# Altium footprint library amirlib.PcbLib: 456 footprints (part 14 of 29)
Each footprint in its own frame and in the unit in brackets; x right, y up, seen from the top. Pads: shape width x height; smd on the part's side, far side on the other; paste and mask are expansions set on the pad; w line width, h text height; cw(c..) or ccw(c..) is an arc to the next point about the centre after c.
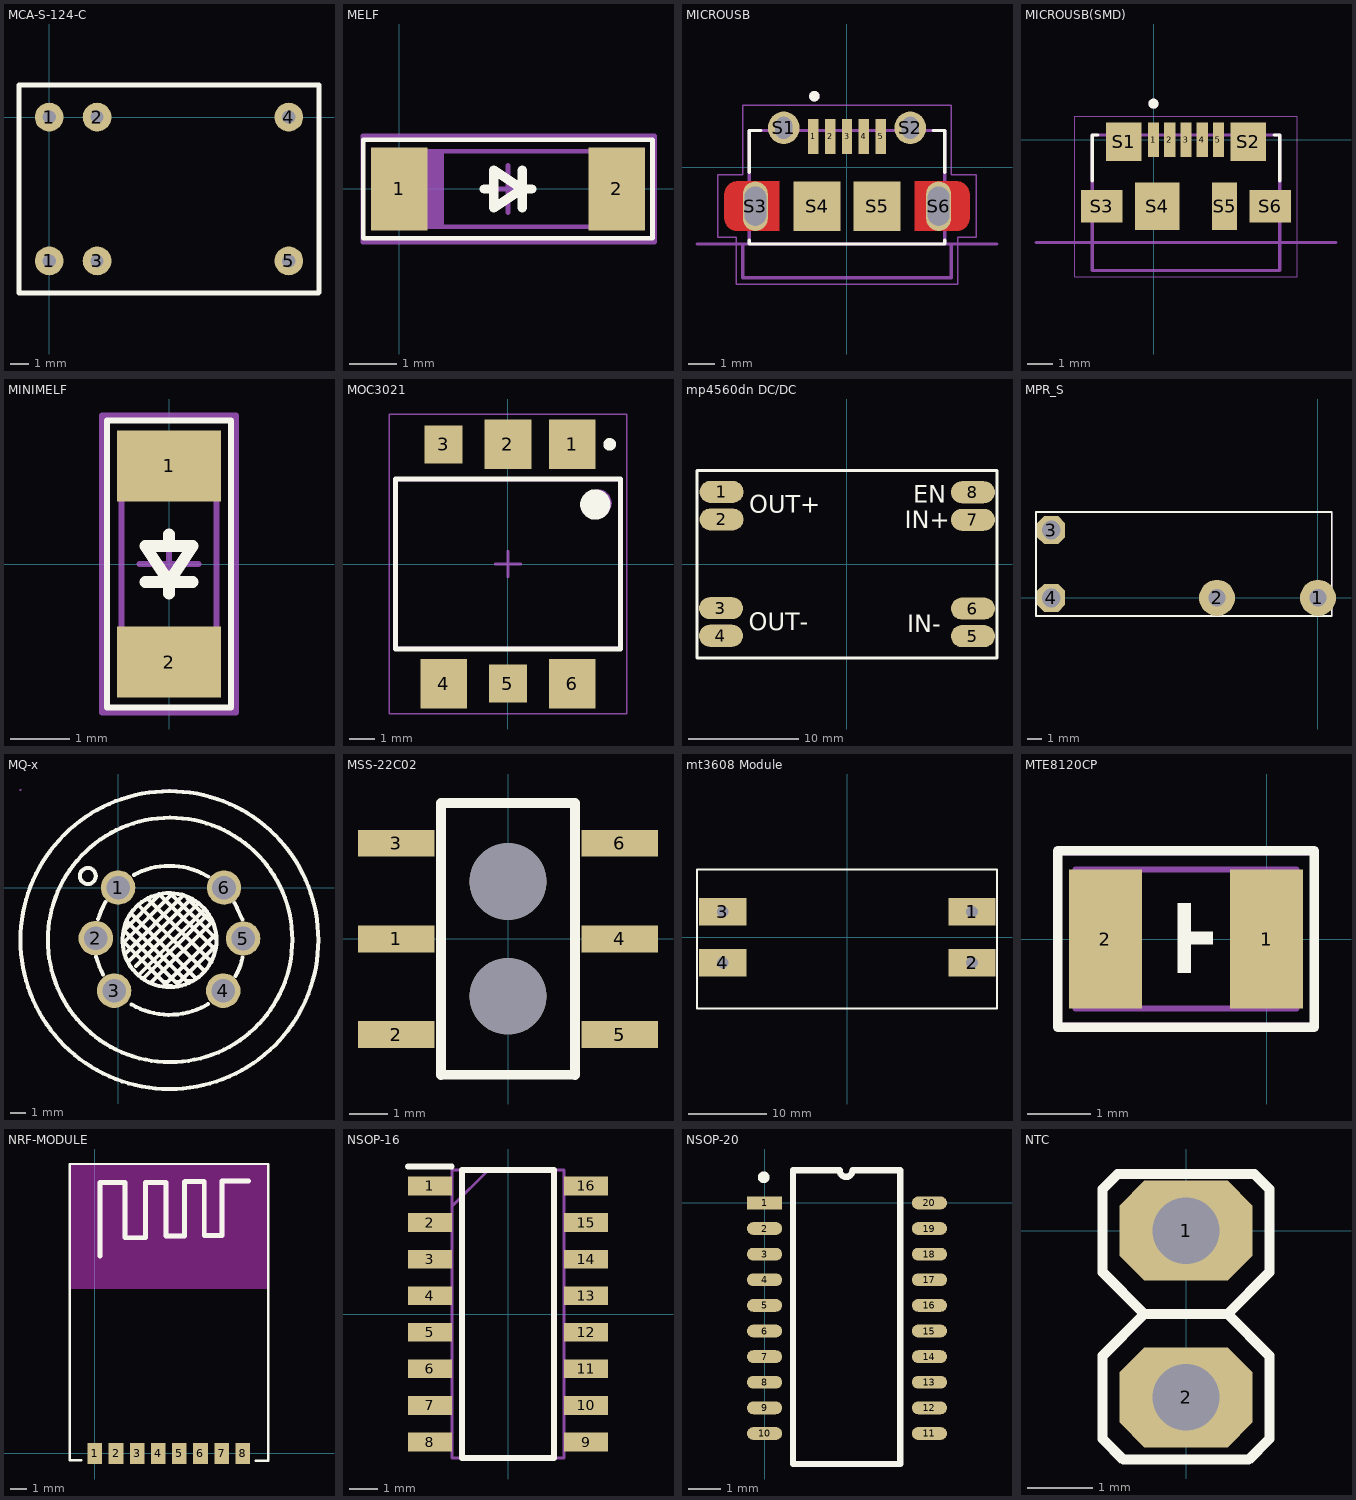
[diagram p13: the footprints below, top view; thin cyan lines are the x and y axes]

## MCA-S-124-C [mil]
pads (6):
  round 60 hole 27.56: 1(0,-300) 1(0,0) 2(100,0) 3(100,-300) 4(500,0) 5(500,-300)
Top Overlay:
  lines w10: -62.99,65.54 -62.99,-366.93 561.99,-366.93 ; -62.99,66.93 562.99,66.93 ; 562.99,-366.54 562.99,66.54

## MELF [mm]
pads (2):
  rect 1.2x1.75 smd: 1(0,0) 2(4.6,0)
Top Overlay:
  lines w0.1: -0.762,-1.041 -0.762,1.041 5.359,1.041 5.359,-1.041 -0.762,-1.041
  lines w0.2: 1.8,0 2,0 ; 2.6,-0.4 2.6,0.4 ; 2.8,0 2.6,0 ; 2.6,0 2,0.4 2,-0.4 2.6,0
Mechanical 13:
  rectangle: 0.45,-0.8 0.948,0.8
  lines w0.1: 0.45,-0.8 4.15,-0.8 4.15,0.8 0.45,0.8 0.45,-0.8
Mechanical 15:
  lines w0.1: 1.8,0 2.8,0 ; 2.3,-0.5 2.3,0.5 ; -0.775,-1.125 5.4,-1.125 5.4,1.125 -0.775,1.125 -0.775,-1.125
3D body "User Library-melf-2.STEP": height 1.59, standoff 0.01, extent 0.473,-0.876 4.173,0.724

## MICROUSB [mm]
pads (11):
  rect 0.4x1.35 smd mask+0.1: 1(-1.3,1.175) 2(-0.65,1.175) 3(0,1.175) 4(0.65,1.175) 5(1.3,1.175)
  oval 1.2x1.25 hole 0.65 slot 0.85 at 90 deg mask+0.1: S1(-2.425,1.5) S2(2.425,1.5)
  oval 0.95x1.9 hole 0.825 slot 1.5 at 90 deg mask+0.1: S3(-3.512,-1.5) S6(3.513,-1.5)
  rect 1.8x1.9 smd mask+0.1: S4(-1.15,-1.5) S5(1.15,-1.5)
Top Layer:
  region: -2.6,-1.5 -3.1,-1.5 -3.1,-1.05 -3.1,-1.034 -3.102,-1.019 -3.104,-1.003 -3.107,-0.988 -3.11,-0.972 -3.115,-0.957 -3.12,-0.942 -3.126,-0.928 -3.133,-0.914 -3.14,-0.9 -3.148,-0.887 -3.157,-0.874 -3.167,-0.861 -3.177,-0.849 -3.188,-0.838 -3.199,-0.827 -3.211,-0.817 -3.224,-0.807 -3.237,-0.798 -3.25,-0.79 -3.264,-0.783 -3.278,-0.776 -3.292,-0.77 -3.307,-0.765 -3.322,-0.76 -3.338,-0.757 -3.353,-0.754 -3.369,-0.752 -3.384,-0.75 -3.641,-0.75 -3.656,-0.752 -3.672,-0.754 -3.687,-0.757 -3.703,-0.76 -3.718,-0.765 -3.733,-0.77 -3.747,-0.776 -3.761,-0.783 -3.775,-0.79 -3.788,-0.798 -3.801,-0.807 -3.814,-0.817 -3.826,-0.827 -3.837,-0.838 -3.848,-0.849 -3.858,-0.861 -3.868,-0.874 -3.877,-0.887 -3.885,-0.9 -3.892,-0.914 -3.899,-0.928 -3.905,-0.942 -3.91,-0.957 -3.915,-0.972 -3.918,-0.988 -3.921,-1.003 -3.923,-1.019 -3.925,-1.034 -3.925,-1.05 -3.925,-1.5 -4.7,-1.5 -4.7,-1.05 -4.699,-1.024 -4.697,-0.998 -4.694,-0.972 -4.689,-0.946 -4.683,-0.921 -4.676,-0.895 -4.667,-0.871 -4.657,-0.847 -4.646,-0.823 -4.633,-0.8 -4.619,-0.778 -4.605,-0.756 -4.589,-0.735 -4.572,-0.715 -4.554,-0.696 -4.535,-0.678 -4.515,-0.661 -4.494,-0.645 -4.472,-0.631 -4.45,-0.617 -4.427,-0.604 -4.403,-0.593 -4.379,-0.583 -4.355,-0.574 -4.329,-0.567 -4.304,-0.561 -4.278,-0.556 -4.252,-0.553 -4.226,-0.551 -4.2,-0.55 -2.6,-0.55
  region: 4.7,-1.95 4.699,-1.976 4.697,-2.002 4.694,-2.028 4.689,-2.054 4.683,-2.079 4.676,-2.105 4.667,-2.129 4.657,-2.153 4.646,-2.177 4.633,-2.2 4.619,-2.222 4.605,-2.244 4.589,-2.265 4.572,-2.285 4.554,-2.304 4.535,-2.322 4.515,-2.339 4.494,-2.355 4.472,-2.369 4.45,-2.383 4.427,-2.396 4.403,-2.407 4.379,-2.417 4.355,-2.426 4.329,-2.433 4.304,-2.439 4.278,-2.444 4.252,-2.447 4.226,-2.449 4.2,-2.45 2.6,-2.45 2.6,-1.5 3.1,-1.5 3.1,-1.95 3.1,-1.966 3.102,-1.981 3.104,-1.997 3.107,-2.012 3.11,-2.028 3.115,-2.043 3.12,-2.058 3.126,-2.072 3.133,-2.086 3.14,-2.1 3.148,-2.113 3.157,-2.126 3.167,-2.139 3.177,-2.151 3.188,-2.162 3.199,-2.173 3.211,-2.183 3.224,-2.193 3.237,-2.202 3.25,-2.21 3.264,-2.217 3.278,-2.224 3.292,-2.23 3.307,-2.235 3.322,-2.24 3.338,-2.243 3.353,-2.246 3.369,-2.248 3.384,-2.25 3.641,-2.25 3.656,-2.248 3.672,-2.246 3.687,-2.243 3.703,-2.24 3.718,-2.235 3.733,-2.23 3.747,-2.224 3.761,-2.217 3.775,-2.21 3.788,-2.202 3.801,-2.193 3.814,-2.183 3.826,-2.173 3.837,-2.162 3.848,-2.151 3.858,-2.139 3.868,-2.126 3.877,-2.113 3.885,-2.1 3.892,-2.086 3.899,-2.072 3.905,-2.058 3.91,-2.043 3.915,-2.028 3.918,-2.012 3.921,-1.997 3.923,-1.981 3.925,-1.966 3.925,-1.95 3.925,-1.5 4.7,-1.5
  region: -2.6,-2.45 -4.2,-2.45 -4.226,-2.449 -4.252,-2.447 -4.278,-2.444 -4.304,-2.439 -4.329,-2.433 -4.355,-2.426 -4.379,-2.417 -4.403,-2.407 -4.427,-2.396 -4.45,-2.383 -4.472,-2.369 -4.494,-2.355 -4.515,-2.339 -4.535,-2.322 -4.554,-2.304 -4.572,-2.285 -4.589,-2.265 -4.605,-2.244 -4.619,-2.222 -4.633,-2.2 -4.646,-2.177 -4.657,-2.153 -4.667,-2.129 -4.676,-2.105 -4.683,-2.079 -4.689,-2.054 -4.694,-2.028 -4.697,-2.002 -4.699,-1.976 -4.7,-1.95 -4.7,-1.5 -3.925,-1.5 -3.925,-1.975 -3.925,-1.989 -3.923,-2.004 -3.922,-2.018 -3.919,-2.032 -3.916,-2.046 -3.912,-2.06 -3.907,-2.074 -3.901,-2.087 -3.895,-2.1 -3.888,-2.113 -3.881,-2.125 -3.872,-2.137 -3.864,-2.148 -3.854,-2.159 -3.844,-2.169 -3.834,-2.179 -3.823,-2.189 -3.812,-2.197 -3.8,-2.206 -3.787,-2.213 -3.775,-2.22 -3.762,-2.226 -3.749,-2.232 -3.735,-2.237 -3.721,-2.241 -3.707,-2.244 -3.693,-2.247 -3.679,-2.248 -3.664,-2.25 -3.384,-2.25 -3.369,-2.248 -3.353,-2.246 -3.338,-2.243 -3.322,-2.24 -3.307,-2.235 -3.292,-2.23 -3.278,-2.224 -3.264,-2.217 -3.25,-2.21 -3.237,-2.202 -3.224,-2.193 -3.211,-2.183 -3.199,-2.173 -3.188,-2.162 -3.177,-2.151 -3.167,-2.139 -3.157,-2.126 -3.148,-2.113 -3.14,-2.1 -3.133,-2.086 -3.126,-2.072 -3.12,-2.058 -3.115,-2.043 -3.11,-2.028 -3.107,-2.012 -3.104,-1.997 -3.102,-1.981 -3.1,-1.966 -3.1,-1.95 -3.1,-1.5 -2.6,-1.5
  region: 4.226,-0.551 4.252,-0.553 4.278,-0.556 4.304,-0.561 4.329,-0.567 4.355,-0.574 4.379,-0.583 4.403,-0.593 4.427,-0.604 4.45,-0.617 4.472,-0.631 4.494,-0.645 4.515,-0.661 4.535,-0.678 4.554,-0.696 4.572,-0.715 4.589,-0.735 4.605,-0.756 4.619,-0.778 4.633,-0.8 4.646,-0.823 4.657,-0.847 4.667,-0.871 4.676,-0.895 4.683,-0.921 4.689,-0.946 4.694,-0.972 4.697,-0.998 4.699,-1.024 4.7,-1.05 4.7,-1.5 3.925,-1.5 3.925,-1.025 3.925,-1.011 3.923,-0.996 3.922,-0.982 3.919,-0.968 3.916,-0.954 3.912,-0.94 3.907,-0.926 3.901,-0.913 3.895,-0.9 3.888,-0.887 3.881,-0.875 3.872,-0.863 3.864,-0.852 3.854,-0.841 3.844,-0.831 3.834,-0.821 3.823,-0.811 3.812,-0.803 3.8,-0.794 3.787,-0.787 3.775,-0.78 3.762,-0.774 3.749,-0.768 3.735,-0.763 3.721,-0.759 3.707,-0.756 3.693,-0.753 3.679,-0.752 3.664,-0.75 3.384,-0.75 3.369,-0.752 3.353,-0.754 3.338,-0.757 3.322,-0.76 3.307,-0.765 3.292,-0.77 3.278,-0.776 3.264,-0.783 3.25,-0.79 3.237,-0.798 3.224,-0.807 3.211,-0.817 3.199,-0.827 3.188,-0.838 3.177,-0.849 3.167,-0.861 3.157,-0.874 3.148,-0.887 3.14,-0.9 3.133,-0.914 3.126,-0.928 3.12,-0.942 3.115,-0.957 3.11,-0.972 3.107,-0.988 3.104,-1.003 3.102,-1.019 3.1,-1.034 3.1,-1.05 3.1,-1.5 2.6,-1.5 2.6,-0.55 4.2,-0.55
Top Overlay:
  circle w0.2: c-1.25,2.715 r0.1
  lines w0.127: -3.75,-2.8 -3.75,-2.95 3.75,-2.95 3.75,-2.8 ; -3.75,-0.2 -3.75,1.4 -3.3,1.4 ; 3.3,1.4 3.75,1.4 3.75,-0.2
Top Paste:
  drawing of 8 lines, arcs and shapes, not listed
Bottom Paste:
  drawing of 8 lines, arcs and shapes, not listed
Top Solder:
  region: -2.5,-2.551 -4.801,-2.551 -4.801,-0.45 -2.5,-0.45
  region: 4.8,-2.553 2.502,-2.553 2.502,-0.45 4.8,-0.45
Bottom Solder:
  region: -2.5,-0.55 -2.6,-0.55 -2.6,-2.45 -2.5,-2.45 -2.5,-2.551 -4.801,-2.551 -4.801,-0.45 -2.5,-0.45
  region: 4.8,-2.553 2.502,-2.553 2.502,-2.45 2.6,-2.45 2.6,-0.55 2.502,-0.55 2.502,-0.45 4.8,-0.45
Mechanical 13:
  circle w0.2: c-1.25,2.715 r0.1
  lines w0.127: -5.75,-2.95 -3.75,-2.95 ; -4,-2.95 -4,-4.25 4,-4.25 4,-2.95 ; 5.75,-2.95 3.75,-2.95 ; -3.75,-2.95 -3.75,1.4 3.75,1.4 3.75,-2.95 ; -3.75,-2.95 3.75,-2.95
Mechanical 15:
  lines w0.05: -4.95,-2.7 -4.95,-0.3 -4,-0.3 -4,2.375 4,2.375 4,-0.3 4.95,-0.3 4.95,-2.7 4.25,-2.7 4.25,-4.5 -4.25,-4.5 -4.25,-2.7 -4.95,-2.7
3D body "step_temp.STEP": height 2.78, standoff -0.72, extent -4.047,-4.375 4.047,1.425

## MICROUSB(SMD) [mm]
pads (11):
  rect 0.45x1.38 smd: 1(0,0) 2(0.65,0) 3(1.3,0) 4(1.95,0) 5(2.6,0)
  rect 1.425x1.55 smd: S1(-1.188,-0.085) S2(3.788,-0.085)
  rect 1.65x1.3 smd: S3(-2.075,-2.66) S6(4.675,-2.66)
  rect 1.8x1.9 smd: S4(0.15,-2.66)
  rect 1x1.9 smd: S5(2.85,-2.66)
Top Overlay:
  circle w0.2: c0,1.44 r0.1
  lines w0.127: -2.45,-1.66 -2.45,0.19 -2.22,0.19 ; 4.82,0.19 5.05,0.19 5.05,-1.66
Mechanical 13:
  circle w0.2: c0,1.44 r0.1
  lines w0.127: -4.7,-4.11 7.3,-4.11 ; -2.45,-5.24 -2.45,0.19 5.05,0.19 5.05,-5.24 -2.45,-5.24
  text "PCB EDGE" at 5.8,-3.91 h0.41
Mechanical 15:
  lines w0.05: -3.15,-5.49 5.75,-5.49 5.75,0.94 -3.15,0.94 -3.15,-5.49
3D body "47346-0001--3DModel-STEP-269445.STEP": height 2.7, standoff -0.25, extent -2.88,-5.209 5.48,0.221

## MINIMELF [mm]
pads (2):
  rect 1.75x1.2 smd: 1(0,1.65) 2(0,-1.65)
Top Overlay:
  lines w0.1: -1.041,-2.413 -1.041,2.413 1.041,2.413 1.041,-2.413 -1.041,-2.413
  lines w0.2: -0.4,-0.3 0.4,-0.3 ; 0,-0.5 0,-0.3 ; 0,0.3 0,0.5 ; 0,-0.3 0.4,0.3 -0.4,0.3 0,-0.3
Mechanical 13:
  region: -0.8,1.85 -0.8,1.352 0.8,1.352 0.8,1.85
  lines w0.1: -0.8,-1.85 0.8,-1.85 0.8,1.85 -0.8,1.85 -0.8,-1.85
Mechanical 15:
  lines w0.1: -0.5,0 0.5,0 ; 0,-0.5 0,0.5 ; -1.125,-2.5 1.125,-2.5 1.125,2.5 -1.125,2.5 -1.125,-2.5
3D body "User Library-Diode MELF.STEP": height 1.55, standoff 0.05, extent -0.75,-1.725 0.75,1.775

## MOC3021 [mm]
pads (6):
  rect 1.85x1.95 smd: 1(2.54,4.725) 2(0,4.725) 4(-2.54,-4.725) 6(2.54,-4.725)
  rect 1.5x1.5 smd: 3(-2.54,4.725) 5(0,-4.725)
Top Overlay:
  circle w0.25: c4.015,4.725 r0.125
  circle w0.6: c3.45,2.35 r0.3
  lines w0.2: -4.45,-3.35 4.45,-3.35 4.45,3.35 -4.45,3.35 -4.45,-3.35
Mechanical 13:
  circle w0.1: c3.55,2.4 r0.5
  lines w0.1: -4.45,-3.3 4.45,-3.3 4.45,3.3 -4.45,3.3 -4.45,-3.3
Mechanical 15:
  lines w0.05: -4.7,-5.925 4.7,-5.925 4.7,5.925 -4.7,5.925 -4.7,-5.925
  lines w0.1: -0.5,0 0.5,0 ; 0,-0.5 0,0.5
3D body "SOP254P1030X508-6N.step": height 5.08, standoff 0, extent -4.45,-5.15 4.45,5.15

## mp4560dn DC/DC [mm]
pads (8):
  oval 4x2 smd paste+0 mask+0.102: 1(-11.384,6.544) 2(-11.384,4.045) 3(-11.436,-4.013) 4(-11.436,-6.513) 5(11.436,-6.544) 6(11.436,-4.045) 7(11.43,4.013) 8(11.43,6.513)
Top Overlay:
  lines w0.254: -13.614,-8.524 13.615,-8.524 13.615,8.494 -13.614,8.494 -13.614,-8.524
  text "IN+" at 5.258,3.236 h1.6
  text "EN" at 6.03,5.541 h1.6
  text "IN-" at 5.487,-6.187 h1.6
  text "OUT-" at -8.937,-6.013 h1.6
  text "OUT+" at -8.885,4.646 h1.6

## MPR_S [mm]
pads (4):
  round 2.5 hole 1.2: 1(0,0) 2(-7,0)
  oct 1.95x1.95 hole 1.3: 3(-18.5,4.7) 4(-18.5,0)
Top Overlay:
  lines w0.127: -19.55,-1.25 -19.55,5.95 0.95,5.95 0.95,-1.25 -19.55,-1.25
Mechanical 13:
  lines w0.127: -19.55,-1.25 -19.55,5.95 0.95,5.95 0.95,-1.25 -19.55,-1.25
3D body: height 15, standoff 0.5, extent -19.55,-1.25 1.024,5.989

## MQ-x [mm]
pads (6):
  round 2.2 hole 1.5: 1(0,0) 2(-1.422,-3.226) 3(-0.254,-6.579) 4(6.706,-6.579) 5(7.976,-3.251) 6(6.756,0)
Top Overlay:
  drawing of 437 lines, arcs and shapes, not listed
Mechanical 6:
  lines w0.051: -6.223,-3.291 cw(c3.277,-3.274) 12.776,-3.291 ; -6.223,-3.288 ccw(c3.277,-3.305) 12.776,-3.288
Mechanical 8:
  region: -6.165,6.228 -6.175,6.195 -6.2,6.172 -6.233,6.167 -6.264,6.182 -6.281,6.21 -6.281,6.243 -6.264,6.271 -6.233,6.286 -6.2,6.281 -6.175,6.259
3D body "C99296_Winsen_MQ-2_24mm.step": height 16.2, standoff -7.8, extent -6.086,-12.724 12.914,6.252

## MSS-22C02 [mm]
pads (8):
  rect 2x0.7 smd: 1(-2.921,0) 2(-2.921,-2.5) 3(-2.921,2.5) 4(2.921,0) 5(2.921,-2.5) 6(2.921,2.5)
  round 2 hole 2: ""(0,-1.5) ""(0,1.5)
Top Overlay:
  lines w0.254: -1.75,-3.556 -1.75,3.544 ; -1.75,-3.55 1.75,-3.55 ; -1.75,3.55 1.75,3.55 ; 1.75,-3.556 1.75,3.544

## mt3608 Module [mm]
pads (4):
  rect 6x3.5 hole 1.5: 1(15.862,3.226) 2(15.862,-3.251) 3(-15.862,3.251) 4(-15.862,-3.251)
Top Overlay:
  lines w0.254: -19.139,-9.068 19.037,-9.068 19.037,8.611 -19.139,8.611 -19.139,-9.068
3D body "MT3608-Module.stp": height 5.87, standoff -0.63, extent -18.489,-9.131 18.519,8.577

## MTE8120CP [mm]
pads (2):
  rect 1.15x2.2 smd: 1(0,0) 2(-2.55,0)
Top Overlay:
  region: -1.402,-0.533 -1.402,0.567 -1.202,0.567 -1.202,0.117 -0.852,0.117 -0.852,-0.083 -1.202,-0.083 -1.202,-0.533
  lines w0.15: -3.307,-1.397 0.757,-1.397 0.757,1.397 -3.307,1.397 -3.307,-1.397
Mechanical 1:
  lines w0.1: -3.025,-1.1 0.475,-1.1 0.475,1.1 -3.025,1.1 -3.025,-1.1
  lines w0.15: 0.175,-0.7 0.175,0.7
Mechanical 15:
  lines w0.05: -3.275,-1.35 0.725,-1.35 0.725,1.35 -3.275,1.35 -3.275,-1.35

## NRF-MODULE [mm]
pads (8):
  rect 0.9x1.3 smd: 1(0,0) 2(1.3,0) 3(2.6,0) 4(3.9,0) 5(5.2,0) 6(6.5,0) 7(7.8,0) 8(9.1,0)
Top Overlay:
  lines w0.15: -0.825,-0.432 -1.55,-0.432 -1.55,17.822 10.675,17.822 10.675,-0.457 9.9,-0.457
  lines w0.3: 0.305,12.167 0.305,13.157 0.305,16.688 1.854,16.688 1.854,13.284 3.124,13.284 3.124,16.688 4.369,16.688 4.369,13.386 5.512,13.386 5.512,16.713 5.537,16.739 6.731,16.739 6.731,13.411 7.823,13.411 7.823,16.764 9.474,16.764
Keep-Out Layer:
  region: -1.55,17.822 -1.55,10.135 10.675,10.135 10.675,17.822
Mechanical 13:
  lines w0.3: 0.305,12.167 0.305,13.157 0.305,16.688 1.854,16.688 1.854,13.284 3.124,13.284 3.124,16.688 4.369,16.688 4.369,13.386 5.512,13.386 5.512,16.713 5.537,16.739 6.731,16.739 6.731,13.411 7.823,13.411 7.823,16.764 9.474,16.764
3D body "User Library-nRF24L01-Mini.STEP": height 0.8, standoff 0, extent -1.479,-0.406 10.521,17.594

## NSOP-16 [mm]
pads (16):
  rect 1.525x0.65 smd: 1(-2.712,4.445) 2(-2.712,3.175) 3(-2.712,1.905) 4(-2.712,0.635) 5(-2.712,-0.635) 6(-2.712,-1.905) 7(-2.712,-3.175) 8(-2.712,-4.445) 9(2.712,-4.445) 10(2.712,-3.175) 11(2.712,-1.905) 12(2.712,-0.635) 13(2.712,0.635) 14(2.712,1.905) 15(2.712,3.175) 16(2.712,4.445)
Top Overlay:
  lines w0.2: -3.475,5.12 -1.95,5.12 ; -1.6,-5.002 -1.6,5.002 1.6,5.002 1.6,-5.002 -1.6,-5.002
Mechanical 15:
  lines w0.1: -1.95,3.732 -0.68,5.002 ; -1.95,-5.002 -1.95,5.002 1.95,5.002 1.95,-5.002 -1.95,-5.002
3D body "HT45F4M_16NSOP-A_.stp": height 1.75, standoff 0, extent -2.947,-5.002 3.047,5.002

## NSOP-20 [mm]
pads (20):
  rect 1.1x0.4 smd: 1(0,0)
  oval 1.1x0.4 smd: 2(0,-0.8) 3(0,-1.6) 4(0,-2.4) 5(0,-3.2) 6(0,-4) 7(0,-4.8) 8(0,-5.6) 9(0,-6.4) 10(0,-7.2) 11(5.15,-7.2) 12(5.15,-6.4) 13(5.15,-5.6) 14(5.15,-4.8) 15(5.15,-4) 16(5.15,-3.2) 17(5.15,-2.4) 18(5.15,-1.6) 19(5.15,-0.8) 20(5.15,0)
Top Overlay:
  circle w0.254: c-0.025,0.8 r0.056
  lines w0.2: 4.213,1.016 2.746,1.016 cw(c2.546,1.016) 2.346,1.016 0.889,1.016 0.889,-8.153 4.242,-8.153 4.242,1.016
3D body "User Library-20NSOP.STEP": height 1.65, standoff 0, extent -0.432,-8.404 5.567,1.191

## NTC [mil]
pads (2):
  oct 80x60 hole 40 mask+7.87: 1(0,0) 2(0,-100)
Top Overlay:
  region: -9.97,-89.98 -9.97,-109.98 10.03,-109.98 10.03,-89.98
  region: -9.97,10.02 -9.97,-9.98 10.03,-9.98 10.03,10.02
  lines w6: -25,-50 -50,-75 -50,-125 -37.6,-137.4 37.6,-137.4 50,-125 50,-75 25,-50 ; -25,-50 -50,-25 -50,25 -41.14,33.86 41.14,33.86 50,25 50,-25 25,-50 ; -25,-50 25,-50
3D body "NXRT15WB473FA1B020.STEP": height 373.79, standoff -452.76, extent -41.36,-129.74 37.38,27.74